# Altium footprint library PCB_ConnectorHDR.PcbLib: 139 footprints (part 5 of 9)
Each footprint in its own frame and in the unit in brackets; x right, y up, seen from the top. Pads: shape width x height; smd on the part's side, far side on the other; paste and mask are expansions set on the pad; w line width, h text height; cw(c..) or ccw(c..) is an arc to the next point about the centre after c.
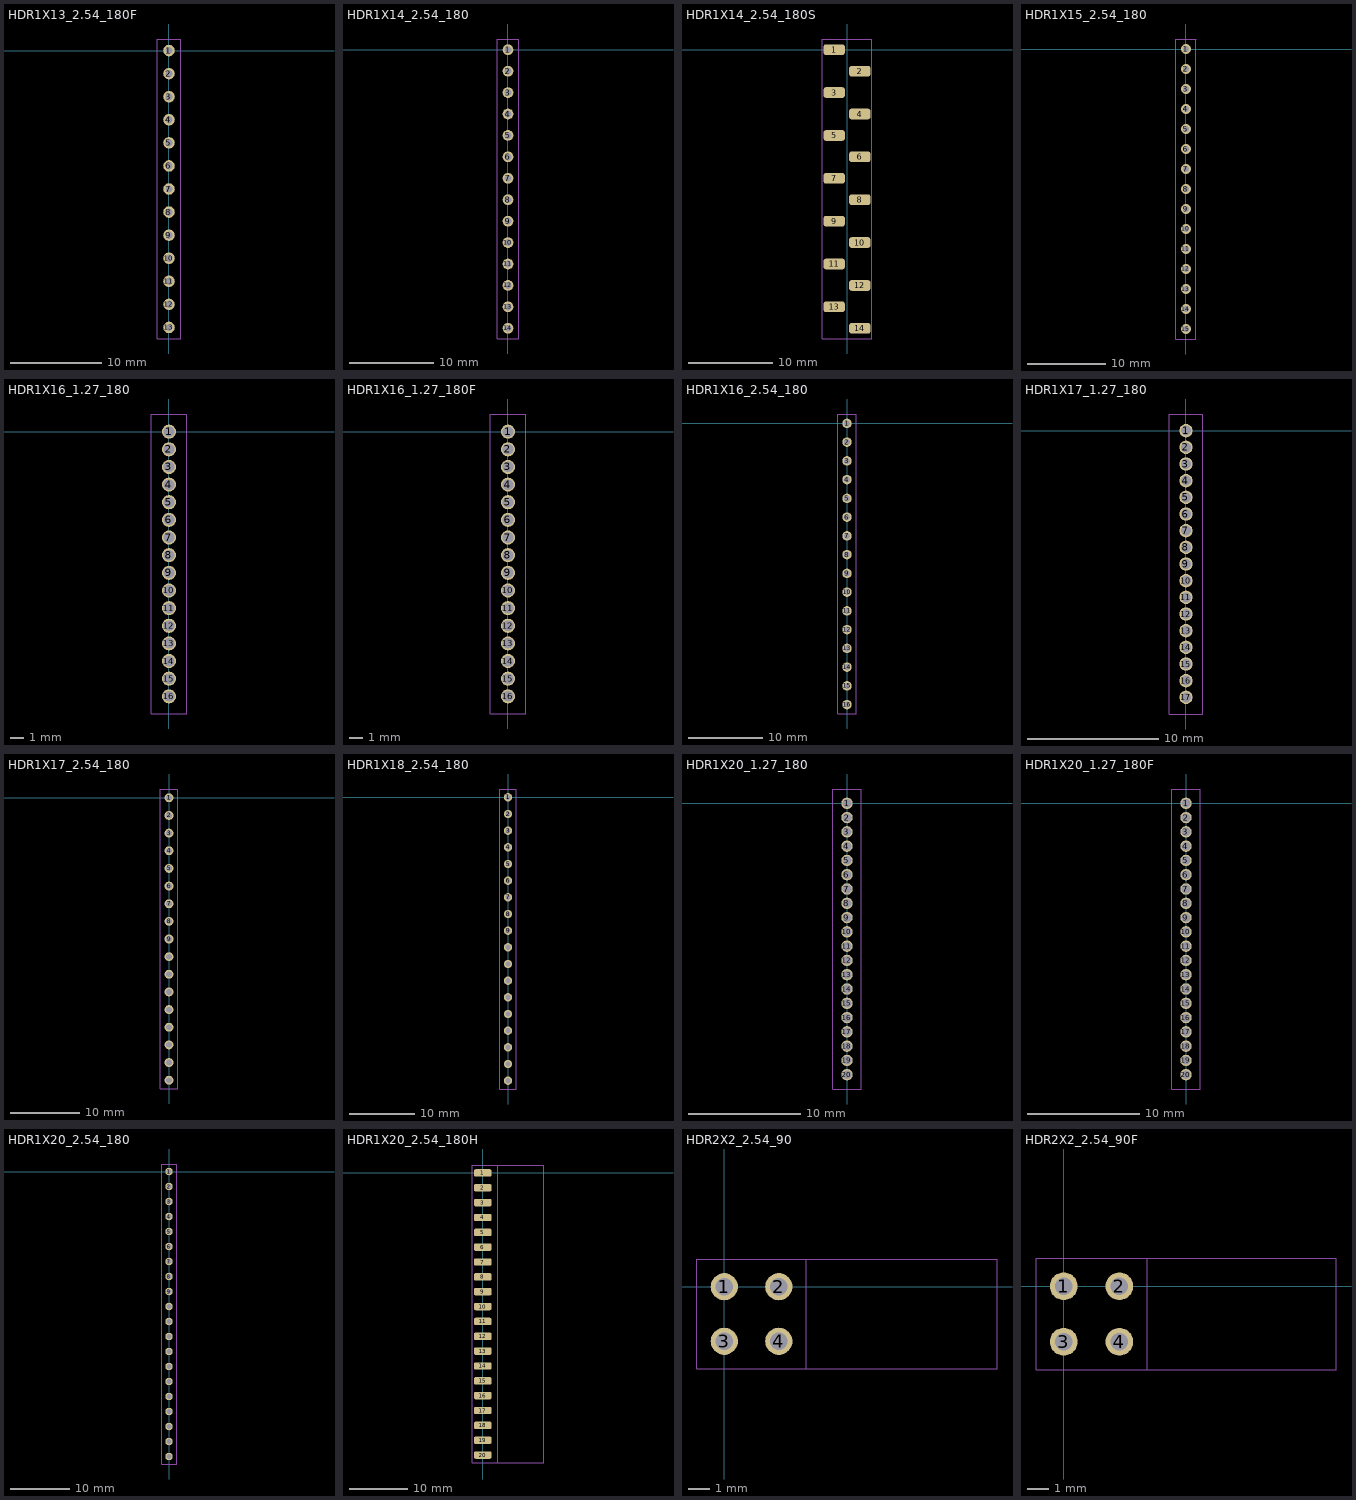
[diagram p4: the footprints below, top view; thin cyan lines are the x and y axes]

## HDR1X13_2.54_180F [mil]
height 169.29
pads (13):
  round 50 hole 32: 1(0,0) 2(0,-100) 3(0,-200) 4(0,-300) 5(0,-400) 6(0,-500) 7(0,-600) 8(0,-700) 9(0,-800) 10(0,-900) 11(0,-1000) 12(0,-1100) 13(0,-1200)
Mechanical 13:
  lines w2: -50,-1250 -50,50 50,50 50,-1250 -50,-1250
T-Component:
  lines w2: -50,-1250 50,-1250 50,50 -50,50 -50,-1250
  text ".Designator" at -31,-620 h80
3D body "female_header_a-bl254-eg-g13d.stp": height 334.65, standoff -125.98, extent -49.2,-1254.91 49.22,54.92

## HDR1X14_2.54_180 [mil]
height 169.29
pads (14):
  round 50 hole 32: 1(0,0) 2(0,-100) 3(0,-200) 4(0,-300) 5(0,-400) 6(0,-500) 7(0,-600) 8(0,-700) 9(0,-800) 10(0,-900) 11(0,-1000) 12(0,-1100) 13(0,-1200) 14(0,-1300)
Mechanical 13:
  lines w2: -50,-1350 -50,50 50,50 50,-1350 -50,-1350
T-Component:
  lines w2: -50,-1350 -50,50 50,50 50,-1350 -50,-1350
  text ".Designator" at -31,-670 h80
3D body "pin_header_aw140-eg-g14d.stp": height 322.83, standoff -118.11, extent -49.18,-1350 49.18,50

## HDR1X14_2.54_180S [mil]
height 169.29
pads (14):
  rrect50% 100x50 smd: 1(-60,0) 2(60,-100) 3(-60,-200) 4(60,-300) 5(-60,-400) 6(60,-500) 7(-60,-600) 8(60,-700) 9(-60,-800) 10(60,-900) 11(-60,-1000) 12(60,-1100) 13(-60,-1200) 14(60,-1300)
Mechanical 13:
  lines w2: -115,-1350 -115,50 115,50 115,-1350 -115,-1350
T-Component:
  lines w2: -115,-1350 115,-1350 115,50 -115,50 -115,-1350
  text ".Designator" at -31,-670 h80
3D body "pin_header_A-SL254-EG-G14MP1.stp": height 386.46, standoff -0.94, extent -98.43,-1349.99 98.43,50.01

## HDR1X15_2.54_180 [mil]
height 169.29
pads (15):
  round 50 hole 32: 1(0,0) 2(0,-100) 3(0,-200) 4(0,-300) 5(0,-400) 6(0,-500) 7(0,-600) 8(0,-700) 9(0,-800) 10(0,-900) 11(0,-1000) 12(0,-1100) 13(0,-1200) 14(0,-1300) 15(0,-1400)
Mechanical 13:
  lines w2: -50,-1450 -50,50 50,50 50,-1450 -50,-1450
T-Component:
  lines w2: -50,-1450 50,-1450 50,50 -50,50 -50,-1450
  text ".Designator" at -31,-720 h80
3D body "pin_header_aw140-eg-g15d.stp": height 322.83, standoff -118.11, extent -49.18,-1449.99 49.18,50

## HDR1X16_1.27_180 [mil]
height 169.29
pads (16):
  round 40 hole 30: 1(0,0) 2(0,-50) 3(0,-100) 4(0,-150) 5(0,-200) 6(0,-250) 7(0,-300) 8(0,-350) 9(0,-400) 10(0,-450) 11(0,-500) 12(0,-550) 13(0,-600) 14(0,-650) 15(0,-700) 16(0,-750)
Mechanical 13:
  lines w2: -50,-800 -50,50 50,50 50,-800 -50,-800
T-Component:
  lines w2: -50,-800 -50,50 50,50 50,-800 -50,-800
  text ".Designator" at -31,-395 h80
3D body "pin_header_a-sl127-eg-g16d.stp": height 210.24, standoff -102.36, extent -49.21,-774.99 49.21,25.01

## HDR1X16_1.27_180F [mil]
height 169.29
pads (16):
  round 40 hole 30: 1(0,0) 2(0,-50) 3(0,-100) 4(0,-150) 5(0,-200) 6(0,-250) 7(0,-300) 8(0,-350) 9(0,-400) 10(0,-450) 11(0,-500) 12(0,-550) 13(0,-600) 14(0,-650) 15(0,-700) 16(0,-750)
Mechanical 13:
  lines w2: -50,-800 50,-800 50,50 -50,50 -50,-800
T-Component:
  lines w2: -50,-800 50,-800 50,50 -50,50 -50,-800
  text ".Designator" at -31,-395 h80
3D body "female_header_a-bl127-eg-g16d.stp": height 133.86, standoff -94.49, extent -35.43,-782.88 35.44,32.88

## HDR1X16_2.54_180 [mil]
height 169.29
pads (16):
  round 50 hole 32: 1(0,0) 2(0,-100) 3(0,-200) 4(0,-300) 5(0,-400) 6(0,-500) 7(0,-600) 8(0,-700) 9(0,-800) 10(0,-900) 11(0,-1000) 12(0,-1100) 13(0,-1200) 14(0,-1300) 15(0,-1400) 16(0,-1500)
Mechanical 13:
  lines w2: -50,-1550 50,-1550 50,50 -50,50 -50,-1550
T-Component:
  lines w2: -50,-1550 50,-1550 50,50 -50,50 -50,-1550
  text ".Designator" at -31,-770 h80
3D body "pin_header_aw140-eg-g16d.stp": height 322.83, standoff -118.11, extent -49.18,-1550 49.18,50

## HDR1X17_1.27_180 [mil]
height 169.29
pads (17):
  round 40 hole 30: 1(0,0) 2(0,-50) 3(0,-100) 4(0,-150) 5(0,-200) 6(0,-250) 7(0,-300) 8(0,-350) 9(0,-400) 10(0,-450) 11(0,-500) 12(0,-550) 13(0,-600) 14(0,-650) 15(0,-700) 16(0,-750) 17(0,-800)
Mechanical 13:
  lines w2: -50,-850 -50,50 50,50 50,-850 -50,-850
T-Component:
  lines w2: -50,-850 50,-850 50,50 -50,50 -50,-850
  text ".Designator" at -31,-420 h80
3D body "pin_header_a-sl127-eg-g17d.stp": height 210.24, standoff -102.36, extent -49.21,-824.99 49.21,25.01

## HDR1X17_2.54_180 [mil]
height 169.29
pads (17):
  round 50 hole 32: 1(0,0) 2(0,-100) 3(0,-200) 4(0,-300) 5(0,-400) 6(0,-500) 7(0,-600) 8(0,-700) 9(0,-800) 10(0,-900) 11(0,-1000) 12(0,-1100) 13(0,-1200) 14(0,-1300) 15(0,-1400) 16(0,-1500) 17(0,-1600)
Mechanical 13:
  lines w2: -50,-1650 -50,50 50,50 50,-1650 -50,-1650
T-Component:
  lines w2: -50,-1650 -50,50 50,50 50,-1650 -50,-1650
  text ".Designator" at -31,-820 h80
3D body "pin_header_aw140-eg-g17d.stp": height 322.83, standoff -118.11, extent -49.18,-1650 49.18,50

## HDR1X18_2.54_180 [mil]
height 169.29
pads (18):
  round 50 hole 32: 1(0,0) 2(0,-100) 3(0,-200) 4(0,-300) 5(0,-400) 6(0,-500) 7(0,-600) 8(0,-700) 9(0,-800) 10(0,-900) 11(0,-1000) 12(0,-1100) 13(0,-1200) 14(0,-1300) 15(0,-1400) 16(0,-1500) 17(0,-1600) 18(0,-1700)
Mechanical 13:
  lines w2: -50,-1750 50,-1750 50,50 -50,50 -50,-1750
T-Component:
  lines w2: -50,-1750 50,-1750 50,50 -50,50 -50,-1750
  text ".Designator" at -31,-870 h80
3D body "pin_header_aw140-eg-g18d.stp": height 322.83, standoff -118.11, extent -49.18,-1750 49.18,50

## HDR1X20_1.27_180 [mil]
height 169.29
pads (20):
  round 40 hole 30: 1(0,0) 2(0,-50) 3(0,-100) 4(0,-150) 5(0,-200) 6(0,-250) 7(0,-300) 8(0,-350) 9(0,-400) 10(0,-450) 11(0,-500) 12(0,-550) 13(0,-600) 14(0,-650) 15(0,-700) 16(0,-750) 17(0,-800) 18(0,-850) 19(-0.01,-900) 20(-0.01,-950)
Mechanical 13:
  lines w2: -50,-1000 -50,50 50,50 50,-1000 -50,-1000
T-Component:
  lines w2: -50,-1000 -50,50 50,50 50,-1000 -50,-1000
  text ".Designator" at -31,-495 h80
3D body "pin_header_a-sl127-eg-g20d.stp": height 210.24, standoff -102.36, extent -49.65,-975 48.77,25

## HDR1X20_1.27_180F [mil]
height 169.29
pads (20):
  round 40 hole 30: 1(0,0) 2(0,-50) 3(0,-100) 4(0,-150) 5(0,-200) 6(0,-250) 7(0,-300) 8(0,-350) 9(0,-400) 10(0,-450) 11(0,-500) 12(0,-550) 13(0,-600) 14(0,-650) 15(0,-700) 16(0,-750) 17(0,-800) 18(0,-850) 19(-0.01,-900) 20(-0.01,-950)
Mechanical 13:
  lines w2: -50,-1000 50,-1000 50,50 -50,50 -50,-1000
T-Component:
  lines w2: -50,-1000 50,-1000 50,50 -50,50 -50,-1000
  text ".Designator" at -31,-495 h80
3D body "female_header_a-bl127-eg-g20d.stp": height 133.86, standoff -94.49, extent -35.87,-982.88 35,32.88

## HDR1X20_2.54_180 [mil]
height 169.29
pads (20):
  round 50 hole 32: 1(0,0) 2(0,-100) 3(0,-200) 4(0,-300) 5(0,-400) 6(0,-500) 7(0,-600) 8(0,-700) 9(0,-800) 10(0,-900) 11(0,-1000) 12(0,-1100) 13(0,-1200) 14(0,-1300) 15(0,-1400) 16(0,-1500) 17(0,-1600) 18(0,-1700) 19(0,-1800) 20(0,-1900)
Mechanical 13:
  lines w2: -50,-1950 50,-1950 50,50 -50,50 -50,-1950
T-Component:
  lines w2: -50,-1950 50,-1950 50,50 -50,50 -50,-1950
  text ".Designator" at -31,-970 h80
3D body "pin_header_aw140-eg-g20d.stp": height 322.83, standoff -118.11, extent -49.32,-1951.06 49.05,48.94

## HDR1X20_2.54_180H [mil]
height 169.29
pads (20):
  rrect50% 120x50 smd: 1(0,0) 2(0,-100) 3(0,-200) 4(0,-300) 5(0,-400) 6(0,-500) 7(0,-600) 8(0,-700) 9(0,-800) 10(0,-900) 11(0,-1000) 12(0,-1100) 13(0,-1200) 14(0,-1300) 15(0,-1400) 16(0,-1500) 17(0,-1600) 18(0,-1700) 19(0,-1800) 20(0,-1900)
Mechanical 13:
  lines w2: -70,-1950 410,-1950 410,50 -70,50 -70,-1950
T-Component:
  lines w2: -70,-1950 100,-1950 100,50 -70,50 -70,-1950
  text ".Designator" at -31,-970 h80
3D body "pin_header_aw140-eg-g20d.stp": height 49.32, standoff -49.05, extent -35,-1950 405.94,50

## HDR2X2_2.54_90 [mil]
height 169.29
pads (4):
  round 50 hole 32: 1(0,0) 2(100,0) 3(0,-100) 4(100,-100)
Mechanical 13:
  lines w2: -50,-150 -50,50 500,50 500,-150 -50,-150
T-Component:
  lines w2: -50,-150 -50,50 150,50 150,-150 -50,-150
  text ".Designator" at 19,-70 h80
3D body "pin_header_awl254-da-g04d.stp": height 198.43, standoff -116.54, extent -10,-150 497.09,50

## HDR2X2_2.54_90F [mil]
height 169.29
pads (4):
  round 50 hole 32: 1(0,0) 2(100,0) 3(0,-100) 4(100,-100)
Mechanical 13:
  lines w2: -50,-150 490,-150 490,50 -50,50 -50,-150
T-Component:
  lines w2: -50,-150 -50,50 150,50 150,-150 -50,-150
  text ".Designator" at 19,-70 h80
3D body "female_header_a-bl254-da-g04d.stp": height 198.43, standoff -124.41, extent -10,-154.92 486.06,54.92